# Altium schematic symbol library Diode%.SchLib: 376 symbols (part 8 of 9)
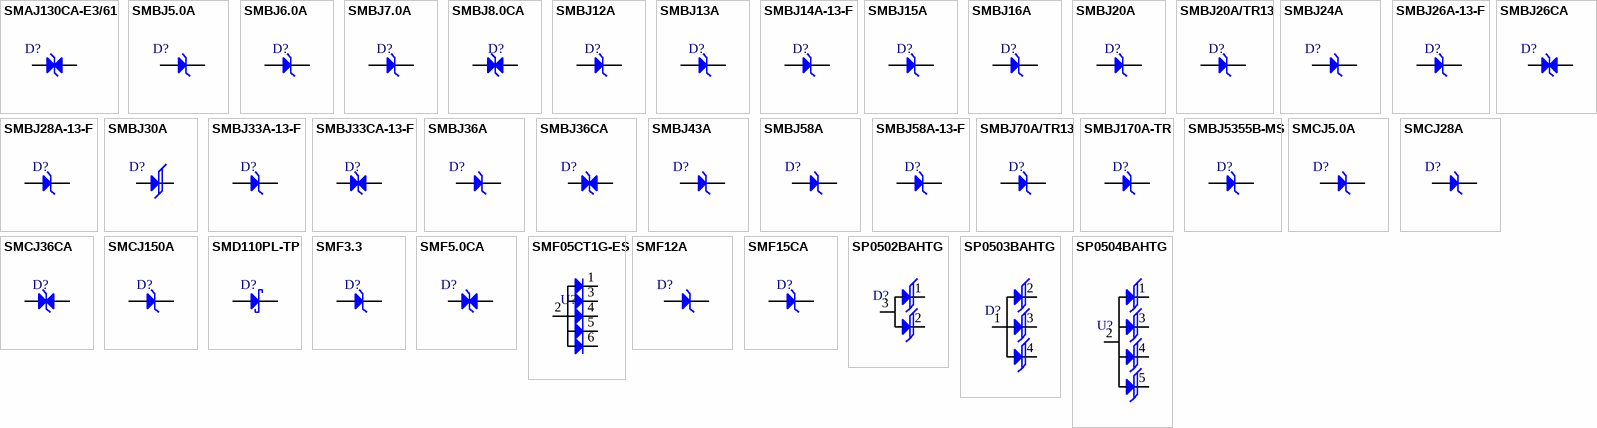
[diagram p16: symbols SMAJ130CA-E3/61 to SP0504BAHTG]

## SMBJ28A-13-F
designator D?
TVS DIODE 28VWM 45.4VC SMB; Manufacturer: Diodes; Manufacturer Part Number: SMBJ28A-13-F; Test Current: 1mA; Number of Elements: 1; Power Dissipation: 600W; Forward Voltage: 5V; Direction: Unidirectional; Reverse Breakdown Voltage: 31.1V; Max Surge Current: 13.2A; Reverse Standoff Voltage: 28V; Clamping Voltage: 45.4V; Power Line Protection: No; Breakdown Voltage: 35.8V; Max Reverse Leakage Current: 5uA; Value: 330pF; Diode Type: ZENER; Supplier: Future Electronics; Supplier Part Number: 8797342; RoHS: Yes; Category: TVS Diodes; Stock: 39000; Pricing: 3000=0.0734, 9000=0.0706, 15000=0.0693, 30000=0.0676, 60000=0.065 (USD); Mounting Technology: Surface Mount; Case/Package: SMB; Pins: 2; Min Operating Temperature: -55°C; Max Operating Temperature: 150°C; Packaging: Tape and Reel; Package Quantity: 3000; Max Power Dissipation: 600W; Series: SMBJ; Number of Unidirectional Channels: 1; Min Breakdown Voltage: 31.1V; Peak Pulse Power: 600W; Polarity: Unidirectional; Termination: SMD/SMT; Peak Pulse Current: 13.2A; Max Breakdown Voltage: 35.8V; Leakage Current: 5uA; Working Voltage: 28V; Voltage Rating (DC): 28V; Max Output current: 13.2A; Clamping Voltage-Max: 45.4V; Length: 4.57mm; Width: 3.9mm; Height: 2.62mm; Radiation Hardening: No; RoHS Compliant: Yes; Lead Free: Lead Free; ComponentLink1URL: https://datasheet.ciiva.com/16387/ds19002-16387564.pdf?src-supplier=Future+Electronics; ComponentLink1Description: https://datasheet.ciiva.com/16387/ds19002-16387564.pdf?src-supplier=Future+Electronics; ComponentLink2URL: https://datasheet.ciiva.com/26912/getdatasheetpartid-234000-26912533.pdf?src-supplier=Verical; ComponentLink2Description: https://datasheet.ciiva.com/26912/getdatasheetpartid-234000-26912533.pdf?src-supplier=Verical; Item Type: Diode
footprint SMB_
pins: 1 A, 2 K

## SMBJ30A
designator D?
48.4V 33.3V 30V SMB(DO-214AA) TVS ROHS; Manufacturer: MDD; Manufacturer Part Number: SMBJ30A; Item Type: Diode; Package: SMB(DO-214AA); LCSC Part Number: C113998; ComponentLink1Description: LCSC; ComponentLink1URL: https://www.lcsc.com/product-detail/TVS_MDD-Microdiode-Electronics-SMBJ30A_C113998.html
footprint SMB_
pins: 1 A, 2 K

## SMBJ33A-13-F
designator D?
TVS DIODE 33VWM 53.3VC SMB; Manufacturer: Diodes; Manufacturer Part Number: SMBJ33A-13-F; Direction: Unidirectional; Reverse Breakdown Voltage: 36.7V; Max Surge Current: 11.3A; Number of Unidirectional Channels: 1; Reverse Standoff Voltage: 33V; Clamping Voltage: 53.3V; Peak Pulse Power: 600W; Power Line Protection: No; Breakdown Voltage: 42.2V; Max Reverse Leakage Current: 5uA; Test Current: 1mA; Diode Type: ZENER; Supplier: Future Electronics; Supplier Part Number: 1049444; RoHS: Yes; Category: TVS Diodes; Stock: 87000; Pricing: 3000=0.0879, 9000=0.0845, 12000=0.0836, 30000=0.0809, 45000=0.0782 (USD); Mounting Technology: Surface Mount; Case/Package: SMB; Pins: 2; Min Operating Temperature: -55°C; Max Operating Temperature: 150°C; Packaging: Tape and Reel; Package Quantity: 3000; Min Breakdown Voltage: 36.7V; Polarity: Unidirectional; Termination: SMD/SMT; Number of Elements: 1; Peak Pulse Current: 11.3A; Max Breakdown Voltage: 42.2V; Power Dissipation: 600W; Leakage Current: 5uA; Working Voltage: 33V; Max Power Dissipation: 600W; Voltage Rating (DC): 33V; Series: SMBJ; Clamping Voltage-Max: 53.3V; Length: 4.57mm; Width: 3.9mm; Height: 2.62mm; Radiation Hardening: No; Lead Free: Lead Free; RoHS Compliant: Yes; ComponentLink1URL: https://datasheet.ciiva.com/16211/ds19002-16211005.pdf?src-supplier=Future+Electronics; ComponentLink1Description: https://datasheet.ciiva.com/16211/ds19002-16211005.pdf?src-supplier=Future+Electronics; ComponentLink2URL: https://datasheet.ciiva.com/26912/getdatasheetpartid-202382-26912459.pdf?src-supplier=Verical; ComponentLink2Description: https://datasheet.ciiva.com/26912/getdatasheetpartid-202382-26912459.pdf?src-supplier=Verical; ComponentLink3URL: https://datasheet.ciiva.com/48477/ds19002-48477445.pdf?src-supplier=Avnet; ComponentLink3Description: https://datasheet.ciiva.com/48477/ds19002-48477445.pdf?src-supplier=Avnet; Item Type: Diode
footprint SMB_
pins: 1 A, 2 K

## SMBJ33CA-13-F
designator D?
TVS DIODE 33VWM 53.3VC SMB; Manufacturer: Diodes; Manufacturer Part Number: SMBJ33CA-13-F; Supplier: Future Electronics; Supplier Part Number: 2822294; RoHS: Yes; Category: TVS Diodes; Stock: 33000; Pricing: 3000=0.0754, 9000=0.0725, 15000=0.0712, 30000=0.0695, 60000=0.0668 (USD); ComponentLink1URL: https://datasheet.ciiva.com/335/ds19002-335120.pdf?src-supplier=Avnet; ComponentLink1Description: https://datasheet.ciiva.com/335/ds19002-335120.pdf?src-supplier=Avnet; ComponentLink2URL: https://datasheet.ciiva.com/15143/getdatasheetpartid-139973-15143680.pdf?src-supplier=Verical; ComponentLink2Description: https://datasheet.ciiva.com/15143/getdatasheetpartid-139973-15143680.pdf?src-supplier=Verical; ComponentLink3URL: https://datasheet.ciiva.com/16353/ds19002-16353960.pdf?src-supplier=Future+Electronics; ComponentLink3Description: https://datasheet.ciiva.com/16353/ds19002-16353960.pdf?src-supplier=Future+Electronics; LCSC Part Number: C135068; Item Type: Diode
footprint SMB Bi Directional
pins: 1 A, 2 K

## SMBJ36A
designator D?
36V 40V Unidirectional 58.1V @ 10.3A 10.3A SMB; Manufacturer: GOODWORK; Manufacturer Part Number: SMBJ36A; Item Type: Diode; Package: SMB(DO-214AA); LCSC Part Number: C2848704; ComponentLink1Description: LCSC; ComponentLink1URL: https://www.lcsc.com/product-detail/TVS_GOODWORK-SMBJ36A_C2848704.html
footprint SMB_
pins: 1 A, 2 K

## SMBJ36CA
designator D?
58.1V 40V 36V Bi-Directional SMB(DO-214AA) TVS ROHS; Manufacturer: Slkor(SLKORMICRO Elec.); Manufacturer Part Number: SMBJ36CA; Item Type: Diode; Package: SMB(DO-214AA); LCSC Part Number: C556189; ComponentLink1Description: LCSC; ComponentLink1URL: https://www.lcsc.com/product-detail/span-style-background-color-ff0-TVS-span_Slkor-SLKORMICRO-Elec-SMBJ36CA_C556189.html
footprint SMB_
pins: 1 A, 2 K

## SMBJ43A
designator D?
8.6A 69.4V 47.8V 43V Unidirectional SMB(DO-214AA) TVS ROHS; Manufacturer: RUILON; Manufacturer Part Number: SMBJ43A; Item Type: Diode; Package: SMB; ComponentLink1Description: LCSC; ComponentLink1URL: https://lcsc.com/product-detail/TVS_RUILON-Shenzhen-Ruilongyuan-Elec-SMBJ43A_C10222.html; LCSC Part: C10222
footprint SMB_
pins: 1 A, 2 K

## SMBJ58A
designator D?
6.5A 600W 93.6V 71.2V 58V SMB(DO-214AA) ESD and Surge Protection (TVS/ESD) ROHS; Manufacturer: MDD(Microdiode Semiconductor); Manufacturer Part Number: SMBJ58A; Item Type: Diode; Package: SMB(DO-214AA); LCSC Part Number: C123824; ComponentLink1Description: LCSC; ComponentLink1URL: https://www.lcsc.com/product-detail/ESD-and-Surge-Protection-TVS-ESD_MDD-Microdiode-Semiconductor-SMBJ58A_C123824.html?s_z=n_SMBJ58A
footprint SMB_
pins: 1 A, 2 K

## SMBJ58A-13-F
designator D?
TVS DIODE 58VWM 93.6VC SMB; Manufacturer: Diodes; Manufacturer Part Number: SMBJ58A-13-F; Supplier: Future Electronics; LCSC Part Number: C135085; RoHS: Yes; Item Type: Diode; Stock: 6000; Pricing: 3000=0.0711, 9000=0.0684, 15000=0.0671, 30000=0.0655, 60000=0.063 (USD); ComponentLink1URL: https://datasheet.ciiva.com/25624/0900766b8104bed2-25624843.pdf?src-supplier=Rs; ComponentLink1Description: https://datasheet.ciiva.com/25624/0900766b8104bed2-25624843.pdf?src-supplier=Rs; ComponentLink2URL: https://datasheet.ciiva.com/15143/getdatasheetpartid-39642-15143045.pdf?src-supplier=Verical; ComponentLink2Description: https://datasheet.ciiva.com/15143/getdatasheetpartid-39642-15143045.pdf?src-supplier=Verical; ComponentLink3URL: https://datasheet.ciiva.com/4520/ds19002-4520617.pdf?src-supplier=Mouser; ComponentLink3Description: https://datasheet.ciiva.com/4520/ds19002-4520617.pdf?src-supplier=Mouser; ComponentLink4URL: https://datasheet.ciiva.com/16393/ds19002-16393005.pdf?src-supplier=Future+Electronics; ComponentLink4Description: https://datasheet.ciiva.com/16393/ds19002-16393005.pdf?src-supplier=Future+Electronics
footprint SMB_
pins: 1 A, 2 K

## SMBJ70A/TR13
designator D?
5.3A 600W 113V 77.8V 70V SMB(DO-214AA) ESD and Surge Protection (TVS/ESD) ROHS; Manufacturer: Brightking; Manufacturer Part Number: SMBJ70A/TR13; Item Type: Diode; Package: SMB(DO-214AA); LCSC Part Number: C309982; ComponentLink1Description: LCSC; ComponentLink1URL: https://lcsc.com/product-detail/ESD-and-Surge-Protection-TVS-ESD_Brightking-SMBJ70A-TR13_C309982.html?s_z=n_SMBJ70A%252FTR13
footprint SMB_
pins: 1 A, 2 K

## SMBJ170A-TR
designator D?
TVS DIODE 170VWM 275VC SMB; Manufacturer: STMicroelectronics; Manufacturer Part Number: SMBJ170A-TR; Item Type: TVS Diodes; Supplier: Mouser; LCSC Part Number: C1973536; RoHS: Yes; Stock: 8410; Pricing: 1=0.3, 10=0.231, 50=0.231, 100=0.167, 1000=0.122, 10000=0.115 (USD); ComponentLink1URL: https://datasheet.ciiva.com/30514/2017842-30514067.pdf?src-supplier=Jameco; ComponentLink1Description: https://datasheet.ciiva.com/30514/2017842-30514067.pdf?src-supplier=Jameco; ComponentLink2URL: https://datasheet.ciiva.com/337/cd00001366-337837.pdf?src-supplier=Digikey; ComponentLink2Description: https://datasheet.ciiva.com/337/cd00001366-337837.pdf?src-supplier=Digikey; ComponentLink3URL: https://datasheet.ciiva.com/337/cd00001366-337838.pdf?src-supplier=Digikey; ComponentLink3Description: https://datasheet.ciiva.com/337/cd00001366-337838.pdf?src-supplier=Digikey; ComponentLink4URL: https://datasheet.ciiva.com/337/cd00001366-337839.pdf?src-supplier=Digikey; ComponentLink4Description: https://datasheet.ciiva.com/337/cd00001366-337839.pdf?src-supplier=Digikey; ComponentLink5URL: https://datasheet.ciiva.com/7973/1761316-7973541.pdf?src-supplier=Element14; ComponentLink5Description: https://datasheet.ciiva.com/7973/1761316-7973541.pdf?src-supplier=Element14; ComponentLink6URL: https://datasheet.ciiva.com/7973/1761316-7973543.pdf?src-supplier=Element14; ComponentLink6Description: https://datasheet.ciiva.com/7973/1761316-7973543.pdf?src-supplier=Element14; ComponentLink7URL: https://datasheet.ciiva.com/26817/getdatasheetpartid-82970-26817756.pdf?src-supplier=Verical; ComponentLink7Description: https://datasheet.ciiva.com/26817/getdatasheetpartid-82970-26817756.pdf?src-supplier=Verical; ComponentLink8URL: https://datasheet.ciiva.com/16487/cd00001366-16487614.pdf?src-supplier=Future+Electronics; ComponentLink8Description: https://datasheet.ciiva.com/16487/cd00001366-16487614.pdf?src-supplier=Future+Electronics; ComponentLink9URL: https://datasheet.ciiva.com/14535/70014015-14535806.pdf?src-supplier=Allied+Electronics; ComponentLink9Description: https://datasheet.ciiva.com/14535/70014015-14535806.pdf?src-supplier=Allied+Electronics
footprint SMB_
pins: 1 A, 2 K

## SMBJ5355B-MS
designator D?
Independent 5W 18V SMB Zener Diodes ROHS; Manufacturer: MSKSEMI; Manufacturer Part Number: SMBJ5355B-MS; Item Type: Diode; Package: SMB; LCSC Part Number: C18547762; ComponentLink1Description: LCSC; ComponentLink1URL: https://lcsc.com/product-detail/Zener-Diodes_MSKSEMI-SMBJ5355B-MS_C18547762.html
footprint SMB_
pins: 1 A, 2 K

## SMCJ5.0A
designator D?
163A 1.5kW 9.2V 7V 5V DO-214AB(SMC) ESD and Surge Protection (TVS/ESD) ROHS; Manufacturer: MDD(Microdiode Semiconductor) SMCJ5.0A; Manufacturer Part Number: SMCJ5.0A; Item Type: TVS Diodes; Supplier: Digikey; Supplier Part Number: SMCJ5.0A; RoHS: Yes; Stock: 60841; Pricing: 1=0.43, 10=0.376, 100=0.2604, 500=0.21758, 1000=0.20375 (USD); LCSC Part Number: C408357
footprint SMC
pins: 1 K, 2 A

## SMCJ28A
designator D?
SMC(DO-214AB) TVS ROHS; Manufacturer: TWGMC; Manufacturer Part Number: SMCJ28A; Item Type: TVS Diode; Package: SMC(DO-214AB); LCSC Part Number: C4154617; ComponentLink1Description: LCSC; ComponentLink1URL: https://www.lcsc.com/product-detail/TVS_TWGMC-SMCJ28A_C4154617.html
footprint SMC
pins: 1 K, 2 A

## SMCJ36CA
designator D?
TVS DIODE 36VWM 58.1VC SMC; Manufacturer: Bourns; Manufacturer Part Number: SMCJ36CA; Item Type: TVS Diodes; Supplier: Digikey; Supplier Part Number: SMCJ36CABCT-ND; RoHS: Yes; Stock: 60841; Pricing: 1=0.43, 10=0.376, 100=0.2604, 500=0.21758, 1000=0.20375 (USD); ComponentLink1URL: https://datasheet.ciiva.com/336/smcj-336308.pdf?src-supplier=Digikey; ComponentLink1Description: https://datasheet.ciiva.com/336/smcj-336308.pdf?src-supplier=Digikey; ComponentLink2URL: https://datasheet.ciiva.com/336/smcj-336309.pdf?src-supplier=Digikey; ComponentLink2Description: https://datasheet.ciiva.com/336/smcj-336309.pdf?src-supplier=Digikey; ComponentLink3URL: https://datasheet.ciiva.com/336/smcj-336310.pdf?src-supplier=Digikey; ComponentLink3Description: https://datasheet.ciiva.com/336/smcj-336310.pdf?src-supplier=Digikey; ComponentLink4URL: https://datasheet.ciiva.com/3022/smcj-3022825.pdf?src-supplier=Avnet; ComponentLink4Description: https://datasheet.ciiva.com/3022/smcj-3022825.pdf?src-supplier=Avnet; ComponentLink5URL: https://datasheet.ciiva.com/3022/smcj-3022826.pdf?src-supplier=Avnet; ComponentLink5Description: https://datasheet.ciiva.com/3022/smcj-3022826.pdf?src-supplier=Avnet; ComponentLink6URL: https://datasheet.ciiva.com/16237/smcj-16237551.pdf?src-supplier=Onlinecomponents.com; ComponentLink6Description: https://datasheet.ciiva.com/16237/smcj-16237551.pdf?src-supplier=Onlinecomponents.com; LCSC Part Number: C2831485
footprint SMC ( Bi-Directional)
pins: 1 A, 2 K

## SMCJ150A
designator D?
6.2A 243V 1.5kW 167V 150V SMC ESD and Surge Protection (TVS/ESD) ROHS; Manufacturer: Liown; Manufacturer Part Number: SMCJ150A; Item Type: Diode; Package: SMC; LCSC Part Number: C2990114; ComponentLink1Description: LCSC; ComponentLink1URL: https://www.lcsc.com/product-detail/ESD-and-Surge-Protection-TVS-ESD_Liown-SMCJ150A_C2990114.html?s_z=n_SMCJ150A-TP
footprint SMC
pins: 1 K, 2 A

## SMD110PL-TP
designator D?
DIODE SCHOTTKY 100V 1A SOD123FL; Manufacturer: MCC; Manufacturer Part Number: SMD110PL-TP; Item Type: Diodes; Supplier: Digikey; LCSC Part Number: C669053; RoHS: Yes; Stock: 3669579; Pricing: 1=0.15, 10=0.105, 100=0.0702, 500=0.05344, 1000=0.04776 (USD); Lead Free: 5697LeadFree; ComponentLink1URL: https://datasheet.ciiva.com/26844/getdatasheetpartid-746365-26844934.pdf?src-supplier=Verical; ComponentLink1Description: https://datasheet.ciiva.com/26844/getdatasheetpartid-746365-26844934.pdf?src-supplier=Verical; ComponentLink2URL: https://datasheet.ciiva.com/913/smd15pl-smd1200plsod-123fl-913095.pdf?src-supplier=Digikey; ComponentLink2Description: https://datasheet.ciiva.com/913/smd15pl-smd1200plsod-123fl-913095.pdf?src-supplier=Digikey; ComponentLink3URL: https://datasheet.ciiva.com/913/smd15pl-smd1200plsod-123fl-913096.pdf?src-supplier=Digikey; ComponentLink3Description: https://datasheet.ciiva.com/913/smd15pl-smd1200plsod-123fl-913096.pdf?src-supplier=Digikey; ComponentLink4URL: https://datasheet.ciiva.com/913/smd15pl-smd1200plsod-123fl-913097.pdf?src-supplier=Digikey; ComponentLink4Description: https://datasheet.ciiva.com/913/smd15pl-smd1200plsod-123fl-913097.pdf?src-supplier=Digikey; Supplier Part Number: MMSZ5243BS-FDICT-ND; Category: Zener Diodes; ComponentLink5URL: https://datasheet.ciiva.com/8348/ds31038-8348008.pdf?src-supplier=Avnet; ComponentLink5Description: https://datasheet.ciiva.com/8348/ds31038-8348008.pdf?src-supplier=Avnet; ComponentLink6URL: https://datasheet.ciiva.com/891/ds31038-891527.pdf?src-supplier=Digikey; ComponentLink6Description: https://datasheet.ciiva.com/891/ds31038-891527.pdf?src-supplier=Digikey; ComponentLink7URL: https://datasheet.ciiva.com/891/ds31038-891528.pdf?src-supplier=Digikey; ComponentLink7Description: https://datasheet.ciiva.com/891/ds31038-891528.pdf?src-supplier=Digikey; ComponentLink8URL: https://datasheet.ciiva.com/891/ds31038-891529.pdf?src-supplier=Digikey; ComponentLink8Description: https://datasheet.ciiva.com/891/ds31038-891529.pdf?src-supplier=Digikey
footprint SOD-123FL
pins: 1 K, 2 A

## SMF3.3
designator D?
TVS DIODE 3.3VWM 6.8VC SOD123F; Manufacturer: Littelfuse; Manufacturer Part Number: SMF3.3; Item Type: TVS Diodes; Breakdown Voltage: 3.4V; Direction: 210Direction; Number of Unidirectional Channels: 1; Reverse Standoff Voltage: 3.3V; Peak Pulse Current: 30A; Peak Pulse Power: 200W; Power Line Protection: No; Diode Type: ZENER; Number of Channels: 1NUMBER; Max Breakdown Voltage: 4.3V; Max Reverse Leakage Current: 500nA; Test Current: 10mA; Supplier: Digikey; LCSC Part Number: C2649858; RoHS: Yes; Stock: 66904; Pricing: 1=0.49, 10=0.313, 100=0.171, 500=0.153, 1000=0.151 (USD); Mounting Technology: Surface Mount; Min Operating Temperature: -55°C; Max Operating Temperature: 150°C; Packaging: Cut Tape; Series: SMF; Min Breakdown Voltage: 3.4V; Reverse Voltage: 3.3V; Height: 1.08mm; RoHS Compliant: Yes
footprint SOD-123FL
pins: 1 K, 2 A

## SMF5.0CA
designator D?
9.2V 6.4V 5V SOD-123FL TVS ROHS; Manufacturer: GOODWORK; Manufacturer Part Number: SMF5.0CA; Item Type: TVS Diode; Package: SOD-123FL; LCSC Part Number: C2980402; ComponentLink1Description: LCSC; ComponentLink1URL: https://www.lcsc.com/product-detail/TVS_GOODWORK-SMF5-0CA_C2980402.html
footprint SOD-123 (Bi-Directional)
pins: 1 A, 2 K

## SMF05CT1G-ES
designator U?
15V 5 Unidirectional 5V SOT-363 ESD Protection Devices ROHS; Manufacturer: ElecSuper; Manufacturer Part Number: SMF05CT1G-ES; Item Type: ESD Diode; Package: SOT-363; LCSC Part Number: C5180312; ComponentLink1Description: LCSC; ComponentLink1URL: https://www.lcsc.com/product-detail/ESD-Protection-Devices_ElecSuper-SMF05CT1G-ES_C5180312.html
footprint SOT-363
pins: 1 IO1, 2 A, 3 IO2, 4 IO3, 5 IO4, 6 IO5

## SMF12A
designator D?
10.1A 200W 19.9V 13.3V 12V SOD-123F Electrostatic and Surge Protection (TVS/ESD) ROHS; Manufacturer: Shandong Jingdao Microelectronics; Manufacturer Part Number: SMF12A; Item Type: Diode; LCSC Part Number: C178259; Package: SOD-123F; ComponentLink7Description: LCSC; ComponentLink7URL: https://www.lcsc.com/product-detail/TVS_AnBon-SMBJ5-0A_C440263.html
footprint SOD-123F
pins: 1 K, 2 A

## SMF15CA
designator D?
8.2A 24.4V 16.7V 15V SOD-123 Electrostatic and Surge Protection (TVS/ESD) ROHS; Manufacturer: FUXINSEMI; Manufacturer Part Number: SMF15CA; Package: SOD-123; LCSC Part Number: C908211; Item Type: TVS/ESD; ComponentLink1Description: LCSC; ComponentLink1URL: https://www.lcsc.com/product-detail/Electrostatic-and-Surge-Protection-TVS-ESD_FUXINSEMI-SMF15CA_C908211.html
footprint SOD-123 (Bi-Directional)
pins: 1 K, 2 A

## SP0502BAHTG
designator D?
TVS DIODE 5.5VWM 8.5VC SOT23-3; Manufacturer: Littelfuse; Manufacturer Part Number: SP0502BAHTG; Supplier: Future Electronics; Supplier Part Number: 5544929; RoHS: Yes; Category: TVS Diodes; Stock: 1160; Pricing: 1=0.78, 15=0.685, 75=0.625, 300=0.575, 1500=0.52 (USD); ComponentLink1URL: https://datasheet.ciiva.com/332/sp05xxba-332272.pdf?src-supplier=Digi-Key; ComponentLink1Description: https://datasheet.ciiva.com/332/sp05xxba-332272.pdf?src-supplier=Digi-Key; ComponentLink2URL: https://datasheet.ciiva.com/5771/littefuse-spa-sp050x-5771122.pdf?src-supplier=Farnell; ComponentLink2Description: https://datasheet.ciiva.com/5771/littefuse-spa-sp050x-5771122.pdf?src-supplier=Farnell; ComponentLink3URL: https://datasheet.ciiva.com/4508/sp05x-leadfree-4508925.pdf?src-supplier=Mouser; ComponentLink3Description: https://datasheet.ciiva.com/4508/sp05x-leadfree-4508925.pdf?src-supplier=Mouser; ComponentLink4URL: https://datasheet.ciiva.com/14536/70184671-14536037.pdf?src-supplier=Allied+Electronics; ComponentLink4Description: https://datasheet.ciiva.com/14536/70184671-14536037.pdf?src-supplier=Allied+Electronics; ComponentLink5URL: https://datasheet.ciiva.com/22735/526672-22735323.pdf?src-supplier=Element14; ComponentLink5Description: https://datasheet.ciiva.com/22735/526672-22735323.pdf?src-supplier=Element14; ComponentLink6URL: https://datasheet.ciiva.com/16392/sp05x-leadfree-16392807.pdf?src-supplier=Future+Electronics; ComponentLink6Description: https://datasheet.ciiva.com/16392/sp05x-leadfree-16392807.pdf?src-supplier=Future+Electronics; ComponentLink7URL: https://datasheet.ciiva.com/332/sp05xxba-332270.pdf?src-supplier=Digi-Key; ComponentLink7Description: https://datasheet.ciiva.com/332/sp05xxba-332270.pdf?src-supplier=Digi-Key; ComponentLink8URL: https://datasheet.ciiva.com/332/sp05xxba-332271.pdf?src-supplier=Digi-Key; ComponentLink8Description: https://datasheet.ciiva.com/332/sp05xxba-332271.pdf?src-supplier=Digi-Key; LCSC Part Number: C207261; Item Type: TVS Diode
footprint SOT-23 (TRANS NPN 40V 0.6A SOT23)
pins: 1 K, 2 K, 3 A

## SP0503BAHTG
designator D?
ESD Suppressor TVS 5.5V 4-Pin(3+Tab) SOT-143 T/R; Manufacturer: Littelfuse; Manufacturer Part Number: SP0503BAHTG; Element Configuration: Common Anode; Direction: Unidirectional; Capacitance: 30pF; Number of Channels: 3; Clamping Voltage: 7.8V; Power Line Protection: No; Polarity: Bidirectional,Unidirectional; Max Power Dissipation: 225mW; ESD Protection: Yes; Max Reverse Leakage Current: 100nA; Voltage Rating (DC): 5V; Diode Type: Avalanche; Clamping Voltage-Max: 8V; Item Type: Diode; Supplier 1: Digi-Key; RoHS: Yes; Category: Diodes; Stock 1: 651; Pricing 1: 1=0.92000, 10=0.81200, 100=0.62260, 500=0.49214, 1000=0.39371 (USD); Mount: Surface Mount; Case/Package: SOT-143; Number of Pins: 4; Min Operating Temperature: -40°C; Max Operating Temperature: 85°C; Operating Supply Voltage: 5.5V; Packaging: Tape and Reel; Number of Unidirectional Channels: 3; Reverse Standoff Voltage: 5.5V; Breakdown Voltage: 5.5V; Termination: SMD/SMT; Working Voltage: 5.5V; Peak Pulse Power: 225mW; Leakage Current: 100nA; Number of Elements: 3; Power Dissipation: 225mW; Resistor Type: Zener; Series: SP05, SPA®; Length: 3.04mm; Width: 1.4mm; Height: 1.05mm; Depth: 1.4mm; Radiation Hardening: No; REACH SVHC: No SVHC; Lead Free: Lead Free; RoHS Compliant: Yes; ComponentLink1URL: https://datasheet.ciiva.com/15143/getdatasheetpartid-116020-15143550.pdf?src-supplier=Verical; ComponentLink1Description: https://datasheet.ciiva.com/15143/getdatasheetpartid-116020-15143550.pdf?src-supplier=Verical; ComponentLink2URL: https://datasheet.ciiva.com/332/sp05xxba-332550.pdf?src-supplier=Digi-Key; ComponentLink2Description: https://datasheet.ciiva.com/332/sp05xxba-332550.pdf?src-supplier=Digi-Key; ComponentLink3URL: https://datasheet.ciiva.com/8062/littefuse-spa-sp050x-8062422.pdf?src-supplier=Element14; ComponentLink3Description: https://datasheet.ciiva.com/8062/littefuse-spa-sp050x-8062422.pdf?src-supplier=Element14; ComponentLink4URL: https://datasheet.ciiva.com/22697/1911798-22697942.pdf?src-supplier=Element14; ComponentLink4Description: https://datasheet.ciiva.com/22697/1911798-22697942.pdf?src-supplier=Element14; ComponentLink5URL: https://datasheet.ciiva.com/332/sp05xxba-332551.pdf?src-supplier=Digi-Key; ComponentLink5Description: https://datasheet.ciiva.com/332/sp05xxba-332551.pdf?src-supplier=Digi-Key; ComponentLink6URL: https://datasheet.ciiva.com/16449/sp05xxba-16449463.pdf?src-supplier=Future+Electronics; ComponentLink6Description: https://datasheet.ciiva.com/16449/sp05xxba-16449463.pdf?src-supplier=Future+Electronics; ComponentLink7URL: https://datasheet.ciiva.com/332/sp05xxba-332552.pdf?src-supplier=Digi-Key; ComponentLink7Description: https://datasheet.ciiva.com/332/sp05xxba-332552.pdf?src-supplier=Digi-Key; ComponentLink8URL: https://datasheet.ciiva.com/4509/sp05x-leadfree-4509162.pdf?src-supplier=Mouser; ComponentLink8Description: https://datasheet.ciiva.com/4509/sp05x-leadfree-4509162.pdf?src-supplier=Mouser; ComponentLink9URL: https://datasheet.ciiva.com/7650/526672-7650894.pdf?src-supplier=Element14; ComponentLink9Description: https://datasheet.ciiva.com/7650/526672-7650894.pdf?src-supplier=Element14; Supplier Part Number 1: F2715CT-ND; LCSC Part Number: C3029025
footprint SOT-143-4_
pins: 1 A, 2 K, 3 K, 4 K

## SP0504BAHTG
designator U?
TVS DIODE 5.5VWM 8.5VC SOT23-5; Manufacturer: Littelfuse; Manufacturer Part Number: SP0504BAHTG; Direction: Unidirectional; Value: 30pF; Number of Channels: 4; Polarity: Bidirectional,Unidirectional; Breakdown Voltage: 5.5V; Clamping Voltage: 7.8V; Max Power Dissipation: 225mW; Power Line Protection: No; Leakage Current: 100nA; ESD Protection: Yes; Voltage Rating (DC): 5V; Diode Type: ZENER; Clamping Voltage-Max: 8V; Supplier 1: Future Electronics; RoHS: Yes; Category: TVS Diodes; Stock 1: 1611; Pricing 1: 1=0.78, 15=0.685, 75=0.625, 300=0.575, 1500=0.52 (USD); Mounting Technology: Surface Mount; Case/Package: SOT-23; Pins: 5; Min Operating Temperature: -40°C; Max Operating Temperature: 85°C; Packaging: Tape and Reel; Termination: SMD/SMT; Working Voltage: 5.5V; Number of Unidirectional Channels: 4; Reverse Standoff Voltage: 5.5V; Number of Elements: 4; Peak Pulse Power: 225mW; Max Reverse Leakage Current: 100nA; Power Dissipation: 225mW; Series: SP05, SPA®; Length: 3.05mm; Width: 1.75mm; Height: 1.3mm; Depth: 1.75mm; Radiation Hardening: No; Lead Free: Lead Free; RoHS Compliant: Yes; Reach SVHC Compliant: Unknown; ComponentLink1URL: https://datasheet.ciiva.com/15143/getdatasheetpartid-152299-15143806.pdf?src-supplier=Verical; ComponentLink1Description: https://datasheet.ciiva.com/15143/getdatasheetpartid-152299-15143806.pdf?src-supplier=Verical; ComponentLink2URL: https://datasheet.ciiva.com/4509/sp05x-leadfree-4509638.pdf?src-supplier=Mouser; ComponentLink2Description: https://datasheet.ciiva.com/4509/sp05x-leadfree-4509638.pdf?src-supplier=Mouser; ComponentLink3URL: https://datasheet.ciiva.com/22697/1911798-22697943.pdf?src-supplier=Element14; ComponentLink3Description: https://datasheet.ciiva.com/22697/1911798-22697943.pdf?src-supplier=Element14; ComponentLink4URL: https://datasheet.ciiva.com/8062/littefuse-spa-sp050x-8062425.pdf?src-supplier=Element14; ComponentLink4Description: https://datasheet.ciiva.com/8062/littefuse-spa-sp050x-8062425.pdf?src-supplier=Element14; ComponentLink5URL: https://datasheet.ciiva.com/332/sp05xxba-332619.pdf?src-supplier=Digi-Key; ComponentLink5Description: https://datasheet.ciiva.com/332/sp05xxba-332619.pdf?src-supplier=Digi-Key; ComponentLink6URL: https://datasheet.ciiva.com/332/sp05xxba-332620.pdf?src-supplier=Digi-Key; ComponentLink6Description: https://datasheet.ciiva.com/332/sp05xxba-332620.pdf?src-supplier=Digi-Key; ComponentLink7URL: https://datasheet.ciiva.com/16393/sp05xxba-16393404.pdf?src-supplier=Future+Electronics; ComponentLink7Description: https://datasheet.ciiva.com/16393/sp05xxba-16393404.pdf?src-supplier=Future+Electronics; ComponentLink8URL: https://datasheet.ciiva.com/332/sp05xxba-332621.pdf?src-supplier=Digi-Key; ComponentLink8Description: https://datasheet.ciiva.com/332/sp05xxba-332621.pdf?src-supplier=Digi-Key; ComponentLink9URL: https://datasheet.ciiva.com/1268/526672-1268494.pdf?src-supplier=Element14; ComponentLink9Description: https://datasheet.ciiva.com/1268/526672-1268494.pdf?src-supplier=Element14; Supplier Part Number 1: 3283009; LCSC Part Number: C10675; Item Type: TVS Diode
footprint SOT-23-5
pins: 1 K, 2 A, 3 K, 4 K, 5 K

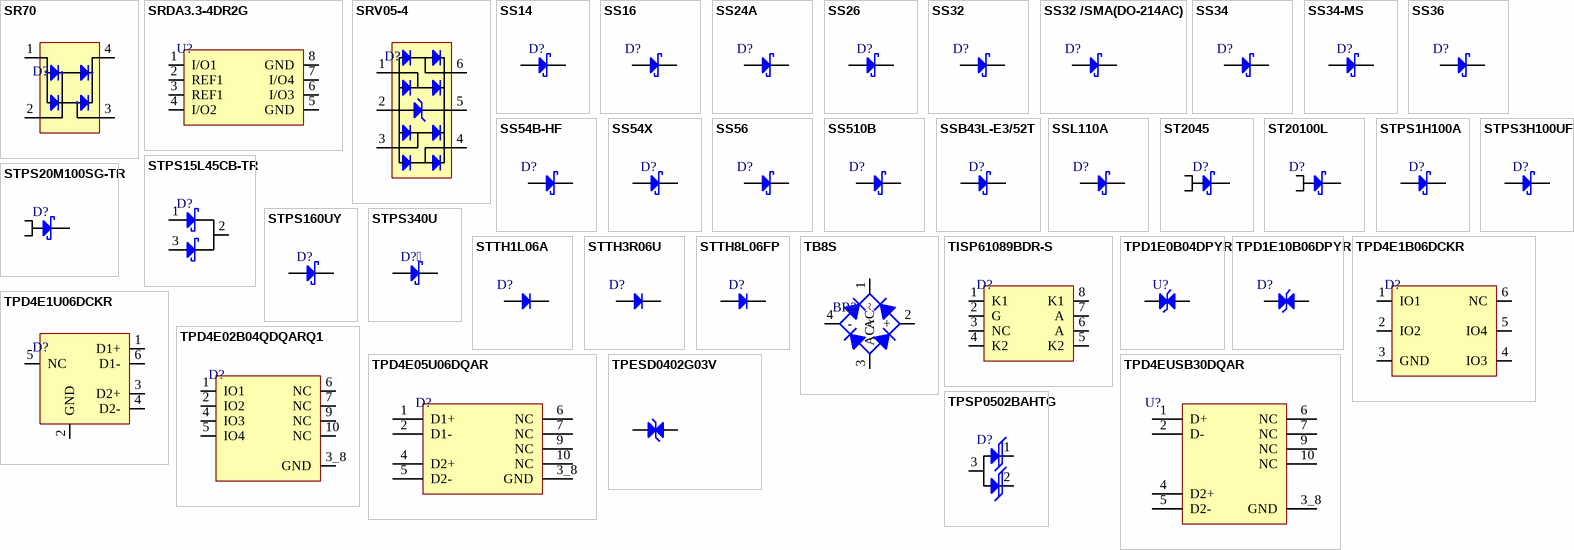
[diagram p8: symbols SR70 to TPSP0502BAHTG]

## SR70
designator D?
24A 7V 85V Unidirectional 70V SOT-143-4 ESD and Surge Protection (TVS/ESD) ROHS; Manufacturer: TECH PUBLIC; Manufacturer Part Number: SR70; Package: SOT-143-4; LCSC Part Number: C907841; Item Type: (TVS/ESD); ComponentLink1Description: LCSC; ComponentLink1URL: https://www.lcsc.com/product-detail/ESD-and-Surge-Protection-TVS-ESD_TECH-PUBLIC-SR70_C907841.html?s_z=n_SR70
footprint SOT-143-4_
pins: 1, 2, 3, 4

## SRDA3.3-4DR2G
designator U?
TVS DIODE 3.3VWM 15VC 8-SOIC; Manufacturer: onsemi; Manufacturer Part Number: SRDA3.3-4DR2G; Item Type: IC; Value: 15pF; Number of Channels: 4; Operating Supply Voltage: 3.3V; Direction: Unidirectional; Min Breakdown Voltage: 5V; Clamping Voltage: 15V; Peak Pulse Power: 500W; Power Line Protection: Yes; Max Reverse Leakage Current: 5uA; Test Current: 1mA; Peak Pulse Current: 25A; Supplier: Digikey; LCSC Part Number: C464120; RoHS: Yes; Stock: 1574; Pricing: 1=1.21, 10=0.947, 100=0.7552, 500=0.5965, 1000=0.54544 (USD); Case/Package: SOIC; Pins: 8; Min Operating Temperature: -55°C; Max Operating Temperature: 150°C; Package Quantity: 2500; Packaging: Tape and Reel; Reverse Standoff Voltage: 3.3V; Number of Bidirectional Channels: 4; Breakdown Voltage: 5V; Termination: SMD/SMT; Max Breakdown Voltage: 5V; ESD Protection: Yes; Leakage Current: 5uA; Working Voltage: 3.3V; Max Power Dissipation: 500W; Number of Lines: 4; Series: -; Clamping Voltage-Max: 15V; Number of Unidirectional Channels: 4; Length: 5mm; Width: 4mm; Height: 1.5mm; Depth: 4mm; Radiation Hardening: No; Lead Free: Lead Free; RoHS Compliant: Yes; ComponentLink1URL: https://datasheet.ciiva.com/12326/srda3-3-4-d-116824-12326751.pdf?src-supplier=Mouser; ComponentLink1Description: https://datasheet.ciiva.com/12326/srda3-3-4-d-116824-12326751.pdf?src-supplier=Mouser; ComponentLink2URL: https://datasheet.ciiva.com/11193/srda3-3-4-d-11193642.pdf?src-supplier=Avnet; ComponentLink2Description: https://datasheet.ciiva.com/11193/srda3-3-4-d-11193642.pdf?src-supplier=Avnet; ComponentLink3URL: https://datasheet.ciiva.com/16489/srda3-3-4-d-16489232.pdf?src-supplier=Future+Electronics; ComponentLink3Description: https://datasheet.ciiva.com/16489/srda3-3-4-d-16489232.pdf?src-supplier=Future+Electronics; ComponentLink4URL: https://datasheet.ciiva.com/26918/getdatasheetpartid-755248-26918055.pdf?src-supplier=Verical; ComponentLink4Description: https://datasheet.ciiva.com/26918/getdatasheetpartid-755248-26918055.pdf?src-supplier=Verical
footprint SOIC-8(0.154", 3.90mm Width)
pins: 1 I/O1, 2 REF1, 3 REF1, 4 I/O2, 5 GND, 6 I/O3, 7 I/O4, 8 GND

## SRV05-4
designator D?
±25kV SOT-23-6 ESD Protection Devices ROHS; Manufacturer: TECH PUBLIC; Manufacturer Part Number: SRV05-4; Package: SOT-23-6; ComponentLink1Description: LCSC; ComponentLink1URL: https://www.lcsc.com/product-detail/ESD-Protection-Devices_TECH-PUBLIC-SRV05-4_C558418.html; LCSC Part Number: C558418; Item Type: ESD Protection Device
footprint SOT-23-6
pins: 1, 2, 3, 4, 5, 6

## SS14
designator D?
40V Independent Type 1A 550mV@1A SMA(DO-214AC) Schottky Diodes ROHS; Manufacturer: MDD(Microdiode Semiconductor); Manufacturer Part Number: SS14; Item Type: Diode; Package: SMA(DO-214AC); LCSC Part Number: C2480; ComponentLink1Description: LCSC; ComponentLink1URL: https://www.lcsc.com/product-detail/Schottky-Diodes_MDD-Microdiode-Semiconductor-SS14_C2480.html?s_z=n_C2480
footprint SMA(DO-214AC)
pins: 1 K, 2 A

## SS16
designator D?
60V 700mV@1A 1A SMA(DO-214AC) Schottky Barrier Diodes (SBD) ROHS; Manufacturer: MDD; Manufacturer Part Number: SS16; Item Type: Schottky Diode; Package: SMA(DO-214AC); LCSC Part Number: C2481; ComponentLink1Description: LCSC; ComponentLink1URL: https://www.lcsc.com/product-detail/Schottky-Barrier-Diodes-SBD_MDD-Microdiode-Electronics-SS16_C2481.html
footprint SMA
pins: 1 K, 2 A

## SS24A
designator D?
40V 500mV@2A 2A SMA(DO-214AC) Schottky Barrier Diodes (SBD) ROHS; Manufacturer: Guangdong Hottech; Manufacturer Part Number: SS24A; Package: SMA(DO-214AC); LCSC Part Number: C2886579; ComponentLink1Description: LCSC; ComponentLink1URL: https://www.lcsc.com/product-detail/Schottky-Barrier-Diodes-SBD_Guangdong-Hottech-SS24A_C2886579.html
footprint SMA
pins: 1 K, 2 A

## SS26
designator D?
60V 700mV@2A 2A SMA(DO-214AC) Schottky Barrier Diodes (SBD) ROHS; Manufacturer: MDD; Manufacturer Part Number: SS26; Item Type: Diode; Package: SMA(DO-214AC); LCSC Part Number: C14238; ComponentLink1Description: LCSC; ComponentLink1URL: https://www.lcsc.com/product-detail/Schottky-Barrier-Diodes-SBD_MDD-Microdiode-Electronics-SS26_C14238.html
footprint SMA(DO-214AC)
pins: 1 K, 2 A

## SS32
designator D?
DIODE SCHOTTKY 20V 3A SMC; Manufacturer: ON Semiconductor / Fairchild; Manufacturer Part Number: SS32; Number of Terminals/Pins: 2; Package Body Material: Plastic; Diode Element Material: SILICON; Element Configuration: Single; Forward Voltage: 500mV; Max Reverse Current: 500uA; Max Forward Surge Current (Ifsm): 100A; Polarity: Standard; Max Power Dissipation: 2.27W; Number of Elements: 1; JEDEC-95 Code: DO-214AB; Supplier 1: Digi-Key; RoHS: Yes; Category: Rectifier Diodes; Stock 1: 2866; Pricing 1: 1=0.83000, 10=0.73200, 100=0.56100, 500=0.44350, 1000=0.35480 (USD); Mount: Surface Mount; Case/Package: SMC; Number of Pins: 2; Weight: 0.3g; Package Shape: Rectangular; Terminal Finish: Tin; Min Operating Temperature: -55°C; Max Operating Temperature: 150°C; Packaging: Tape and Reel; Series: -; Package Quantity: 1; Voltage Rating (DC): 20V; Current Rating: 3A; Output Current: 3A; Forward Current: 3A; Max Repetitive Reverse Voltage (Vrrm): 20V; Max Surge Current: 100A; Max Reverse Leakage Current: 500uA; Peak Non-Repetitive Surge Current: 100A; Average Rectified Current: 3A; Max Reverse Voltage (DC): 20V; Moisture Sensitivity Level: 1; JESD-30 Code: R-PDSO-C2; Peak Reflow Temperature (Cel): 260°C; Surface Mount: Yes; Terminal Position: DUAL; Technology: SCHOTTKY; Number of Phases: 1; Terminal Form: C BEND; Length: 7.15mm; Width: 6.25mm; Height: 2.75mm; Radiation Hardening: No; RoHS Compliant: Yes; Lead Free: Lead Free; Reach SVHC Compliant: Yes; Supplier Part Number 1: SS32CT-ND; LCSC Part Number: *; Item Type: *; ComponentLink1Description: New link; ComponentLink1URL: *
footprint SMC
pins: 1 K, 2 A

## SS32 /SMA(DO-214AC)
designator D?
20V 500mV@3A 3A SMA(DO-214AC) Schottky Barrier Diodes (SBD) ROHS; Manufacturer: MDD; Manufacturer Part Number: SS32; Item Type: Diode; Package: SMA(DO-214AC); LCSC Part Number: C34897; ComponentLink1Description: LCSC; ComponentLink1URL: https://www.lcsc.com/product-detail/Schottky-Barrier-Diodes-SBD_MDD-Microdiode-Electronics-SS32_C34897.html
footprint SMA
pins: 1 K, 2 A

## SS34
designator D?
0.5mA@40V 40V Single 3A 0.55V@3A SMA(DO-214AC) Schottky Barrier Diodes (SBD) ROHS; Manufacturer: MDD; Manufacturer Part Number: SS34; Item Type: Diode; Package: SMA(DO-214AC); LCSC Part Number: C8678; ComponentLink1Description: LCSC; ComponentLink1URL: https://www.lcsc.com/product-detail/Schottky-Barrier-Diodes-SBD_MDD-Microdiode-Electronics-SS34_C8678.html
footprint SMA
pins: 1 K, 2 A

## SS34-MS
designator D?
40V 3A 550mV@3A SMA(DO-214AC) Schottky Diodes ROHS; Manufacturer: MSKSEMI; Manufacturer Part Number: SS34-MS; Item Type: Diode; Package: SMA(DO-214AC); LCSC Part Number: C2836396; ComponentLink1Description: LCSC; ComponentLink1URL: https://www.lcsc.com/product-detail/Schottky-Diodes_MSKSEMI-SS34-MS_C2836396.html
footprint SMA(DO-214AC)
pins: 1 K, 2 A

## SS36
designator D?
Schottky Barrier Diode SK36, DO-214AB, 3A/60V; Manufacturer: ON Semiconductor / Fairchild; Manufacturer Part Number: SS36; Output Current: 3A; Element Configuration: Single; Forward Voltage: 750mV; Max Repetitive Reverse Voltage (Vrrm): 60V; Max Forward Surge Current (Ifsm): 100A; Max Reverse Current: 500uA; Polarity: Standard; Power Dissipation: 2.27W; Supplier 1: Rs; RoHS: Yes; Category: Schottky Diodes; Stock 1: 100; Pricing 1: 100=0.43800, 500=0.34200, 1000=0.27800, 3000=0.25000 (GBP); Mount: Surface Mount; Case/Package: SMC; Number of Pins: 2; Min Operating Temperature: -55°C; Max Operating Temperature: 150°C; Packaging: Tape and Reel; Package Quantity: 3000; Series: -; Forward Current: 3A; Peak Non-Repetitive Surge Current: 100A; Voltage Rating (DC): 60V; Current Rating: 3A; Max Surge Current: 100A; Average Rectified Current: 3A; Max Reverse Leakage Current: 500uA; Max Reverse Voltage (DC): 60V; Current: 3A; Voltage: 60V; Radiation Hardening: No; RoHS Compliant: Yes; Reach SVHC Compliant: Yes; Lead Free: Lead Free; ComponentLink1URL: https://datasheet.ciiva.com/4714/ss36-197193-4714610.pdf?src-supplier=Mouser; ComponentLink1Description: https://datasheet.ciiva.com/4714/ss36-197193-4714610.pdf?src-supplier=Mouser; ComponentLink2URL: https://datasheet.ciiva.com/16889/ss36-16889545.pdf?src-supplier=Future+Electronics; ComponentLink2Description: https://datasheet.ciiva.com/16889/ss36-16889545.pdf?src-supplier=Future+Electronics; ComponentLink3URL: https://datasheet.ciiva.com/920/ss34-920433.pdf?src-supplier=Digi-Key; ComponentLink3Description: https://datasheet.ciiva.com/920/ss34-920433.pdf?src-supplier=Digi-Key; ComponentLink4URL: https://datasheet.ciiva.com/920/ss34-920434.pdf?src-supplier=Digi-Key; ComponentLink4Description: https://datasheet.ciiva.com/920/ss34-920434.pdf?src-supplier=Digi-Key; ComponentLink5URL: https://datasheet.ciiva.com/920/ss34-920435.pdf?src-supplier=Digi-Key; ComponentLink5Description: https://datasheet.ciiva.com/920/ss34-920435.pdf?src-supplier=Digi-Key; Supplier Part Number 1: 9034425P; LCSC Part Number: C16015; Item Type: Diode
footprint SMA
pins: 1 K, 2 A

## SS54B-HF
designator D?
DIODE SCHOTTKY 5A 40V SMB; Manufacturer: Comchip; Manufacturer Part Number: SS54B-HF; Supplier 1: Mouser; RoHS: No; Stock 1: 2862; Pricing 1: 1=0.56000, 10=0.32900, 50=0.32900, 100=0.17100, 1000=0.11900, 10000=0.09000 (USD); Supplier Part Number 1: 750-SS54B-HF; LCSC Part Number: C3759253
footprint SMB_
pins: 1 A, 2 K

## SS54X
designator D?
40V 5A SMA Schottky Diodes ROHS; Manufacturer: Shenzhen JingYang; Manufacturer Part Number: SS54X; Item Type: Diode; Package: SMA; LCSC Part Number: C5307984; ComponentLink1Description: LCSC; ComponentLink1URL: https://www.lcsc.com/product-detail/Schottky-Diodes_Shenzhen-JingYang-SS54X_C5307984.html
footprint SMA
pins: 1 K, 2 A

## SS56
designator D?
DIODE SCHOTTKY 60V 5A SMA; Manufacturer Part Number: SS56; Manufacturer: MDD; LCSC Par Number: C65009; Iterm Type: Diode; ComponentLink1Description: LCSC; ComponentLink1URL: https://www.lcsc.com/product-detail/Schottky-Barrier-Diodes-SBD_MDD-Microdiode-Electronics-SS56_C65009.html
footprint SMA
pins: 1 K, 2 A

## SS510B
designator D?
SCHOTTKY DIODE SMB 100V 5A; Manufacturer: MDD; Manufacturer Part Number: SS510B; Package: SMB; ComponentLink1Description: LCSC; ComponentLink1URL: https://www.lcsc.com/product-detail/Schottky-Barrier-Diodes-SBD_JUXING-SS510B_C3011128.html; LCSC Part Number: C3011128; Item Type: Diode
footprint SMB_
pins: 1 A, 2 K

## SSB43L-E3/52T
designator D?
DIODE SCHOTTKY 30V 4A DO214AA; Manufacturer: Vishay Semiconductors; Manufacturer Part Number: SSB43L-E3/52T; Forward Voltage: 450mV; Max Reverse Current: 600uA; Peak Non-Repetitive Surge Current: 100A; Polarity: 4901Direction; Reverse Voltage: 21V; Supplier: Mouser; Supplier Part Number: 625-SSB43L-E3; RoHS: Yes; Category: Rectifier Diodes; Stock: 10903; Pricing: 1=0.55, 10=0.472, 50=0.472, 100=0.332, 1000=0.187, 10000=0.167 (USD); Mounting Technology: Surface Mount; Case/Package: DO-214AA; Pins: 2; Min Operating Temperature: -65°C; Max Operating Temperature: 150°C; Packaging: Tape and Reel; Forward Current: 4A; Package Quantity: 1; Average Rectified Current: 4A; Max Repetitive Reverse Voltage (Vrrm): 30V; Max Forward Surge Current (Ifsm): 100A; Max Reverse Voltage (DC): 30V; Max Surge Current: 100A; Max Reverse Leakage Current: 600uA; Output Current: 4A; Voltage Rating (DC): 30V; Current Rating: 4A; Length: 4.7mm; Width: 3.8mm; Height: 0.095inch; Radiation Hardening: No; RoHS Compliant: Yes; Reach SVHC Compliant: Unknown; Lead Free: 5697LeadFree; ComponentLink1URL: https://datasheet.ciiva.com/14634/0900766b80dd0508-14634162.pdf?src-supplier=Allied+Electronics; ComponentLink1Description: https://datasheet.ciiva.com/14634/0900766b80dd0508-14634162.pdf?src-supplier=Allied+Electronics; ComponentLink2URL: https://datasheet.ciiva.com/4245/ssb43l-4245635.pdf?src-supplier=Arrow+Electronics; ComponentLink2Description: https://datasheet.ciiva.com/4245/ssb43l-4245635.pdf?src-supplier=Arrow+Electronics; ComponentLink3URL: https://datasheet.ciiva.com/15224/getdatasheetpartid-99263-15224680.pdf?src-supplier=Verical; ComponentLink3Description: https://datasheet.ciiva.com/15224/getdatasheetpartid-99263-15224680.pdf?src-supplier=Verical; ComponentLink4URL: https://datasheet.ciiva.com/7962/64541-7962449.pdf?src-supplier=Element14; ComponentLink4Description: https://datasheet.ciiva.com/7962/64541-7962449.pdf?src-supplier=Element14; ComponentLink5URL: https://datasheet.ciiva.com/18434/70217334-18434422.pdf?src-supplier=Allied+Electronics; ComponentLink5Description: https://datasheet.ciiva.com/18434/70217334-18434422.pdf?src-supplier=Allied+Electronics; LCSC Part Number: C222519; Item Type: Diode
footprint SMB_
pins: 1 A, 2 K

## SSL110A
designator D?
500μA@100V 100V Single 600mV@1A 1A SMA Schottky Barrier Diodes (SBD) ROHS; Manufacturer: Yangzhou; Manufacturer Part Number: SSL110A; Package: SMA; ComponentLink1Description: LCSC; ComponentLink1URL: https://www.lcsc.com/product-detail/Schottky-Barrier-Diodes-SBD_Yangzhou-Yangjie-Elec-Tech-SSL110A_C698870.html; LCSC Part Number: C698870
footprint SMA
pins: 1 K, 2 A

## ST2045
designator D?
45V Independent Type 20A 470mV@20A TO-277 Schottky Diodes ROHS; Manufacturer: MDD; Manufacturer Part Number: ST2045; Item Type: Diode; Package: TO-277; LCSC Part Number: C840773; ComponentLink1Description: LCSC; ComponentLink1URL: https://www.lcsc.com/product-detail/Schottky-Diodes_MDD-Microdiode-Semiconductor-ST2045_C840773.html
footprint TO-277
pins: 1 A1, 2 K, 3 A2

## ST20100L
designator D?
100V Single 650mV@20A 20A TO-277 Schottky Barrier Diodes (SBD) ROHS; Manufacturer: Jiangsu Changjing Electronics Technology Co., Ltd.; Manufacturer Part Number: ST20100L; Item Type: Diode; Package: TO-277; LCSC Part Number: C2693410; ComponentLink1Description: LCSC; ComponentLink1URL: https://www.lcsc.com/product-detail/Schottky-Barrier-Diodes-SBD_Jiangsu-Changjing-Electronics-Technology-Co-Ltd-ST20100L_C2693410.html
footprint TO-277
pins: 1 A1, 2 K, 3 A2

## STPS1H100A
designator D?
DIODE SCHOTTKY 100V 1A SMA; Manufacturer: STMicroelectronics; Manufacturer Part Number: STPS1H100A; Item Type: Diodes; Max Reverse Current: 4uA; Peak Non-Repetitive Surge Current: 50A; Forward Voltage: 860mV; Polarity: Standard; Supplier: Mouser; LCSC Part Number: C165701; RoHS: Yes; Stock: 7367; Pricing: 1=0.34, 10=0.222, 50=0.222, 100=0.12, 1000=0.099, 10000=0.064 (USD); Mounting Technology: Surface Mount; Case/Package: SMA; Pins: 2; Min Operating Temperature: -65°C; Max Operating Temperature: 175°C; Max Repetitive Reverse Voltage (Vrrm): 100V; Forward Current: 1A; Packaging: Tape and Reel; Average Rectified Current: 1A; Series: -; Max Surge Current: 50A; Package Quantity: 5000; Max Reverse Leakage Current: 4uA; Max Forward Surge Current (Ifsm): 50A; Termination: SMD/SMT; Voltage Rating (DC): 100V; Output Current: 1A; Current Rating: 1A; Max Reverse Voltage (DC): 100V; Length: 4.6mm; Width: 2.95mm; Height: 2.03mm; Radiation Hardening: No; RoHS Compliant: Yes; Reach SVHC Compliant: No; Lead Free: Lead Free; ComponentLink1URL: https://datasheet.ciiva.com/14167/cd00001304-14167861.pdf?src-supplier=Distrelec; ComponentLink1Description: https://datasheet.ciiva.com/14167/cd00001304-14167861.pdf?src-supplier=Distrelec; ComponentLink2URL: https://datasheet.ciiva.com/915/cd00001304-915848.pdf?src-supplier=Digikey; ComponentLink2Description: https://datasheet.ciiva.com/915/cd00001304-915848.pdf?src-supplier=Digikey; ComponentLink3URL: https://datasheet.ciiva.com/7964/1690209-7964154.pdf?src-supplier=Element14; ComponentLink3Description: https://datasheet.ciiva.com/7964/1690209-7964154.pdf?src-supplier=Element14; ComponentLink4URL: https://datasheet.ciiva.com/915/cd00001304-915847.pdf?src-supplier=Digikey; ComponentLink4Description: https://datasheet.ciiva.com/915/cd00001304-915847.pdf?src-supplier=Digikey; ComponentLink5URL: https://datasheet.ciiva.com/915/cd00001304-915846.pdf?src-supplier=Digikey; ComponentLink5Description: https://datasheet.ciiva.com/915/cd00001304-915846.pdf?src-supplier=Digikey
footprint SMA
pins: 1 K, 2 A

## STPS3H100UF
designator D?
DIODE SCHOTTKY 100V 3A SMBFLAT; Manufacturer: STMicroelectronics; Manufacturer Part Number: STPS3H100UF; Supplier: Mouser; LCSC Part Number: C155643; RoHS: Yes; Item Type: Diode; Stock: 122842; Pricing: 1=0.35, 10=0.257, 50=0.257, 100=0.213, 1000=0.143, 10000=0.103 (USD); Lead Free: 5697LeadFree; RoHS Compliant: 5897YesNo; ComponentLink1URL: https://datasheet.ciiva.com/4716/cd00256107-65241-4716262.pdf?src-supplier=Mouser; ComponentLink1Description: https://datasheet.ciiva.com/4716/cd00256107-65241-4716262.pdf?src-supplier=Mouser; ComponentLink2URL: https://datasheet.ciiva.com/915/cd00256107-915837.pdf?src-supplier=Digikey; ComponentLink2Description: https://datasheet.ciiva.com/915/cd00256107-915837.pdf?src-supplier=Digikey; ComponentLink3URL: https://datasheet.ciiva.com/915/cd00256107-915838.pdf?src-supplier=Digikey; ComponentLink3Description: https://datasheet.ciiva.com/915/cd00256107-915838.pdf?src-supplier=Digikey; ComponentLink4URL: https://datasheet.ciiva.com/915/cd00256107-915839.pdf?src-supplier=Digikey; ComponentLink4Description: https://datasheet.ciiva.com/915/cd00256107-915839.pdf?src-supplier=Digikey; ComponentLink5URL: https://datasheet.ciiva.com/16491/cd00256107-16491518.pdf?src-supplier=Future+Electronics; ComponentLink5Description: https://datasheet.ciiva.com/16491/cd00256107-16491518.pdf?src-supplier=Future+Electronics
footprint SMB_
pins: 1 A, 2 K

## STPS15L45CB-TR
designator D?
DIODE ARR SCHOTT 45V 7.5A DPAK; Manufacturer: STMicroelectronics; Manufacturer Part Number: STPS15L45CB-TR; Item Type: Rectifier Diodes; Supplier: Future Electronics; Supplier Part Number: 3034630; RoHS: Yes; Stock: 23; Pricing: 1=0.345, 15=0.315, 75=0.295, 250=0.28, 1250=0.255 (USD); ComponentLink1URL: https://datasheet.ciiva.com/14167/cd00004902-14167904.pdf?src-supplier=Distrelec; ComponentLink1Description: https://datasheet.ciiva.com/14167/cd00004902-14167904.pdf?src-supplier=Distrelec; ComponentLink2URL: https://datasheet.ciiva.com/16220/cd00002833-16220149.pdf?src-supplier=Future+Electronics; ComponentLink2Description: https://datasheet.ciiva.com/16220/cd00002833-16220149.pdf?src-supplier=Future+Electronics; ComponentLink3URL: https://datasheet.ciiva.com/906/cd00002833-906411.pdf?src-supplier=Digikey; ComponentLink3Description: https://datasheet.ciiva.com/906/cd00002833-906411.pdf?src-supplier=Digikey; ComponentLink4URL: https://datasheet.ciiva.com/906/cd00002833-906412.pdf?src-supplier=Digikey; ComponentLink4Description: https://datasheet.ciiva.com/906/cd00002833-906412.pdf?src-supplier=Digikey; ComponentLink5URL: https://datasheet.ciiva.com/49516/1407865-49516442.pdf?src-supplier=Jameco; ComponentLink5Description: https://datasheet.ciiva.com/49516/1407865-49516442.pdf?src-supplier=Jameco; LCSC Part Number: C183005
footprint TO-252-2L
pins: 1 A, 2 K, 3 A

## STPS20M100SG-TR
designator D?
DIODE SCHOTTKY 100V 20A D2PAK; Manufacturer: STMicroelectronics; Manufacturer Part Number: STPS20M100SG-TR; Supplier: Mouser; Supplier Part Number: 511-STPS20M100SG-TR; RoHS: Yes; Category: Rectifier Diodes; Stock: 6295; Pricing: 1=2.95, 10=2.48, 50=2.48, 100=2.01, 1000=1.53, 10000=1.38 (USD); ComponentLink1URL: https://datasheet.ciiva.com/16356/cd00228904-16356744.pdf?src-supplier=Future+Electronics; ComponentLink1Description: https://datasheet.ciiva.com/16356/cd00228904-16356744.pdf?src-supplier=Future+Electronics; ComponentLink2URL: https://datasheet.ciiva.com/917/cd00228904-917526.pdf?src-supplier=Digikey; ComponentLink2Description: https://datasheet.ciiva.com/917/cd00228904-917526.pdf?src-supplier=Digikey; ComponentLink3URL: https://datasheet.ciiva.com/917/cd00228904-917527.pdf?src-supplier=Digikey; ComponentLink3Description: https://datasheet.ciiva.com/917/cd00228904-917527.pdf?src-supplier=Digikey; LCSC Part Number: C969989; Item Type: Diode
footprint D2Pak.
pins: 1 A, 2 A, 3 K

## STPS160UY
designator D?
DIODE SCHOTTKY 60V 1A SMB; Manufacturer: STMicroelectronics; Manufacturer Part Number: STPS160UY; Supplier: Mouser; LCSC Part Number: C5268303; RoHS: Yes; Item Type: Diode; Stock: 2181; Pricing: 1=0.46, 10=0.458, 50=0.458, 100=0.458, 1000=0.314, 10000=0.107 (USD); Mounting Technology: Surface Mount; Case/Package: SMB; Packaging: Tape and Reel; Package Quantity: 1; Average Rectified Current: 1A; Max Reverse Voltage (DC): 60V; Series: -; RoHS Compliant: Yes; ComponentLink1URL: https://datasheet.ciiva.com/6380/dm00058656-6380741.pdf?src-supplier=Digikey; ComponentLink1Description: https://datasheet.ciiva.com/6380/dm00058656-6380741.pdf?src-supplier=Digikey
footprint SMB_
pins: 1 A, 2 K

## STPS340U
designator D?
40V 3A 570mV SMB Schottky Barrier Diodes (SBD) ROHS; Manufacturer: Tokmas; Manufacturer Part Number: STPS340U; Item Type: Diode; Package: SMB; LCSC Part Number: C5377821; ComponentLink1Description: LCSC; ComponentLink1URL: https://www.lcsc.com/product-detail/Schottky-Barrier-Diodes-SBD_Tokmas-STPS340U_C5377821.html
footprint SMB_
pins: 1 A, 2 K